# EAGLE library part NRF52840-QIAA-R (library NRF52840-QIAA-R)
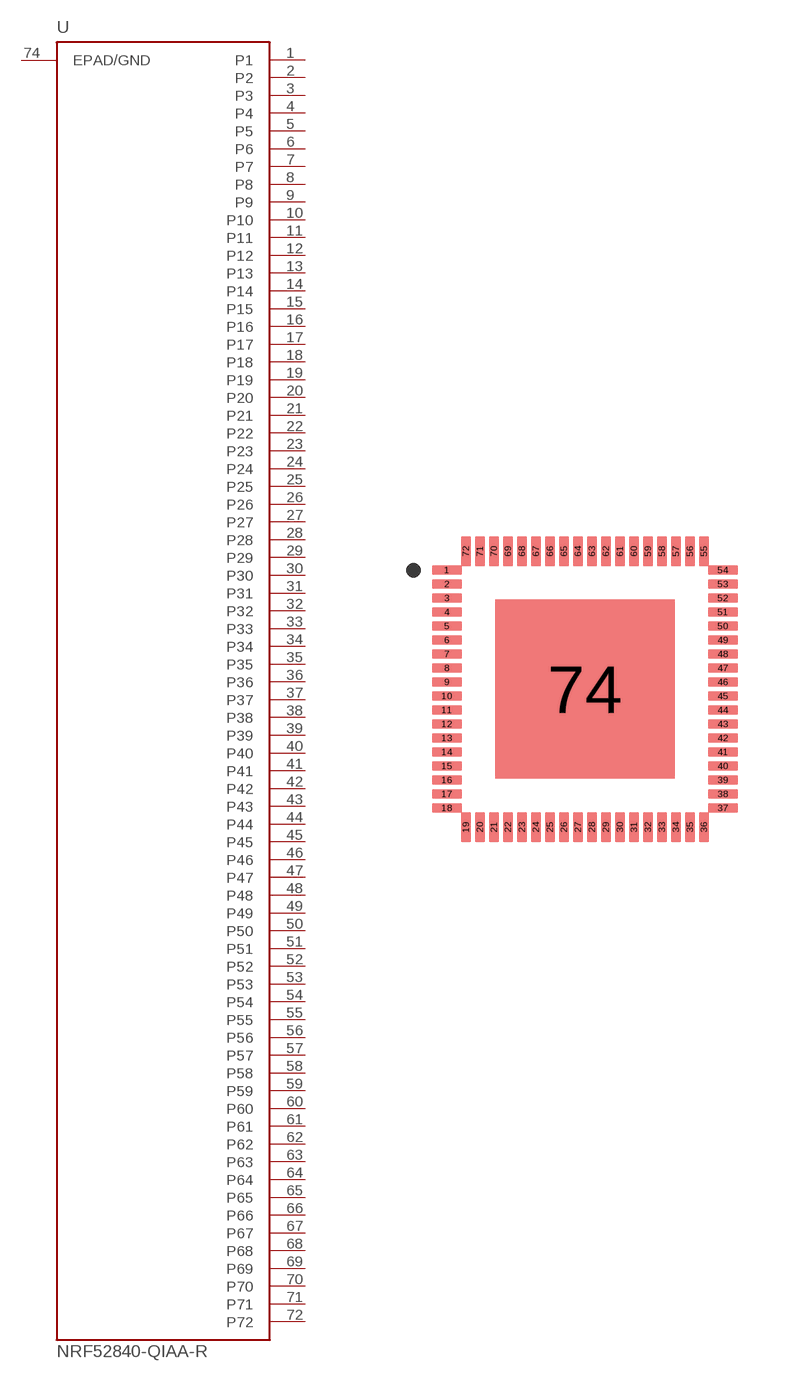
[diagram p0: symbol with the pads of C190794_AQFN-73-EP_7x7; footprint C190794_AQFN-73-EP_7x7]

Designator prefix U

## NRF52840-QIAA-R  [C190794_AQFN-73-EP_7x7]
1  P1
2  P2
3  P3
4  P4
5  P5
6  P6
7  P7
8  P8
9  P9
10  P10
11  P11
12  P12
13  P13
14  P14
15  P15
16  P16
17  P17
18  P18
19  P19
20  P20
21  P21
22  P22
23  P23
24  P24
25  P25
26  P26
27  P27
28  P28
29  P29
30  P30
31  P31
32  P32
33  P33
34  P34
35  P35
36  P36
37  P37
38  P38
39  P39
40  P40
41  P41
42  P42
43  P43
44  P44
45  P45
46  P46
47  P47
48  P48
49  P49
50  P50
51  P51
52  P52
53  P53
54  P54
55  P55
56  P56
57  P57
58  P58
59  P59
60  P60
61  P61
62  P62
63  P63
64  P64
65  P65
66  P66
67  P67
68  P68
69  P69
70  P70
71  P71
72  P72
74  EPAD/GND  pwr

## Footprint C190794_AQFN-73-EP_7x7 (pad centres in mm)
NRF52840-QIAA-R — Clean-Room IPC-7351B Quad (AQFN-73-EP(7x7))
smd 0.75 x 0.24: 1 -3.45,2.975; 2 -3.45,2.625; 3 -3.45,2.275; 4 -3.45,1.925; 5 -3.45,1.575; 6 -3.45,1.225; 7 -3.45,0.875; 8 -3.45,0.525; 9 -3.45,0.175; 10 -3.45,-0.175; 11 -3.45,-0.525; 12 -3.45,-0.875; 13 -3.45,-1.225; 14 -3.45,-1.575; 15 -3.45,-1.925; 16 -3.45,-2.275; 17 -3.45,-2.625; 18 -3.45,-2.975; 37 3.45,-2.975; 38 3.45,-2.625; 39 3.45,-2.275; 40 3.45,-1.925; 41 3.45,-1.575; 42 3.45,-1.225; 43 3.45,-0.875; 44 3.45,-0.525; 45 3.45,-0.175; 46 3.45,0.175; 47 3.45,0.525; 48 3.45,0.875; 49 3.45,1.225; 50 3.45,1.575; 51 3.45,1.925; 52 3.45,2.275; 53 3.45,2.625; 54 3.45,2.975
smd 0.24 x 0.75: 19 -2.975,-3.45; 20 -2.625,-3.45; 21 -2.275,-3.45; 22 -1.925,-3.45; 23 -1.575,-3.45; 24 -1.225,-3.45; 25 -0.875,-3.45; 26 -0.525,-3.45; 27 -0.175,-3.45; 28 0.175,-3.45; 29 0.525,-3.45; 30 0.875,-3.45; 31 1.225,-3.45; 32 1.575,-3.45; 33 1.925,-3.45; 34 2.275,-3.45; 35 2.625,-3.45; 36 2.975,-3.45; 55 2.975,3.45; 56 2.625,3.45; 57 2.275,3.45; 58 1.925,3.45; 59 1.575,3.45; 60 1.225,3.45; 61 0.875,3.45; 62 0.525,3.45; 63 0.175,3.45; 64 -0.175,3.45; 65 -0.525,3.45; 66 -0.875,3.45; 67 -1.225,3.45; 68 -1.575,3.45; 69 -1.925,3.45; 70 -2.275,3.45; 71 -2.625,3.45; 72 -2.975,3.45
smd 4.48 x 4.48: 74 0,0